# Altium footprint library 5.30-BW16.PcbLib: 1 footprints
Each footprint in its own frame and in the unit in brackets; x right, y up, seen from the top. Pads: shape width x height; smd on the part's side, far side on the other; paste and mask are expansions set on the pad; w line width, h text height; cw(c..) or ccw(c..) is an arc to the next point about the centre after c.
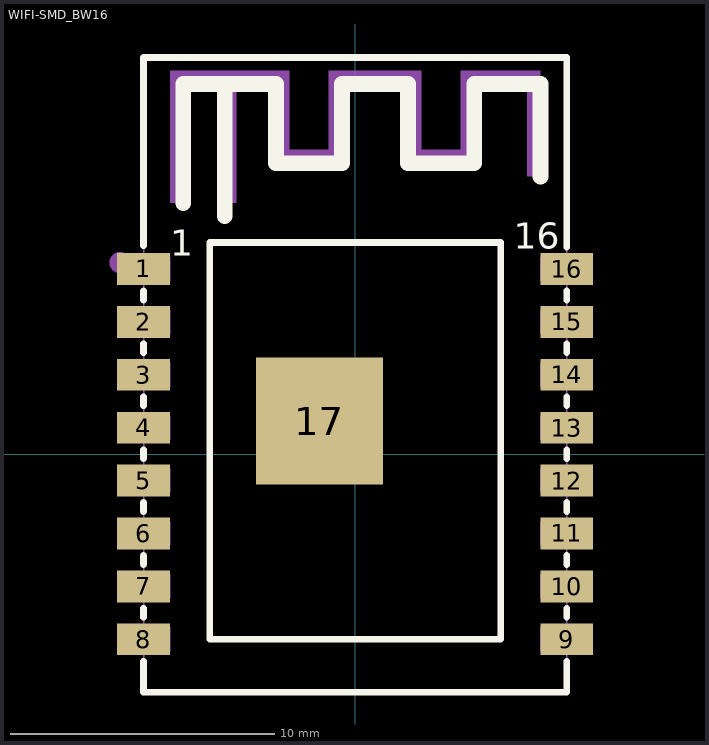
[diagram p0: the footprint, top view; thin cyan lines are the x and y axes]

## WIFI-SMD_BW16 [mm]
pads (17):
  rect 2x1.2 smd paste+0 mask+0.05: 1(-8,7) 2(-8,5) 3(-8,3) 4(-8,1) 5(-8,-1) 6(-8,-3) 7(-8,-5) 8(-8,-7) 9(8,-7) 10(8,-5) 11(8,-3) 12(8,-1) 13(8,1) 14(8,3) 15(8,5) 16(8,7)
  rect 4.8x4.8 smd paste+0 mask+0.05: 17(-1.35,1.25)
Top Overlay:
  lines w0.254: -8.001,7.874 -8,14.923 ; -8,-7.831 -8,-8.5 -8,-9 8,-9 8,-8.5 8,-7.831 ; -8,-6.169 -8,-5.831 ; -8,-4.169 -8,-3.831 ; -8,-2.169 -8,-1.831 ; -8,-0.169 -8,0.169 ; -8,1.831 -8,2.169 ; -8,3.831 -8,4.169 ; -8,5.831 -8,6.169 ; -8,15 8,15 ; 8,-6.169 8,-5.831 ; 8,-4.169 8,-3.831 ; 8,-2.169 8,-1.831 ; 8,-0.169 8,0.169 ; 8,1.831 8,2.169 ; 8,3.831 8,4.169 ; 8,5.831 8,6.169 ; 8,7.831 8.002,15.001 ; -5.5,-7 5.5,-7 5.5,8 -5.5,8 -5.5,-7
  lines w0.6: -6.5,9.501 -6.5,13.999 -3,13.999 -3,11 -0.5,11 -0.5,13.999 1.999,13.999 1.999,11 4.501,11 4.501,13.999 ; -4.93,9 -4.93,13.999 ; 4.5,14 7,14 7,10.5
  text "1" at -7,7.5 h1
  text "16" at 6,7.766 h1
Mechanical 6:
  circle w0.4: c-8.89,7.239 r0.2
  region: -7,9.5 -7,14.5 -6.5,14.5 -6.5,9.5
  region: -6.5,14.5 -5,14.5 -5,14 -6.5,14
  region: -5,14.5 -4.5,14.5 -4.5,9.5 -5,9.5
  region: -4.5,14.5 -2.5,14.5 -2.5,14 -4.5,14
  region: -2.5,14 -2.5,11 -3,11 -3,14
  region: -0.5,11.5 -0.5,11 -2.5,11 -2.5,11.5
  region: -0.5,11.5 -0.5,14.5 -1,14.5 -1,11.5
  region: -0.5,14.5 2.5,14.5 2.5,14 -0.5,14
  region: 2.5,14 2.5,11 2,11 2,14
  region: 2.5,11 4.5,11 4.5,11.5 2.5,11.5
  region: 4.5,11.5 4.5,14.5 4,14.5 4,11.5
  region: 4.5,14.5 7,14.5 7,14 4.5,14
  region: 7,14 7,10.5 6.5,10.5 6.5,14
Mechanical 15:
  region: -7.94,15 -7.94,14.975 -7.975,14.94 -8.025,14.94 -8.06,14.975 -8.06,15 -8.06,15.025 -8.025,15.06 -7.975,15.06 -7.94,15.025 -7.94,15
  region: 7,6.55 7,7.45 8,7.45 8,6.55
  region: 7,4.55 7,5.45 8,5.45 8,4.55
  region: 7,2.55 7,3.45 8,3.45 8,2.55
  region: 7,0.55 7,1.45 8,1.45 8,0.55
  region: 7,-1.45 7,-0.55 8,-0.55 8,-1.45
  region: 7,-3.45 7,-2.55 8,-2.55 8,-3.45
  region: 7,-5.45 7,-4.55 8,-4.55 8,-5.45
  region: 7,-7.45 7,-6.55 8,-6.55 8,-7.45
  region: -7,-6.55 -7,-7.45 -8,-7.45 -8,-6.55
  region: -7,-4.55 -7,-5.45 -8,-5.45 -8,-4.55
  region: -7,-2.55 -7,-3.45 -8,-3.45 -8,-2.55
  region: -7,-0.55 -7,-1.45 -8,-1.45 -8,-0.55
  region: -7,1.45 -7,0.55 -8,0.55 -8,1.45
  region: -7,3.45 -7,2.55 -8,2.55 -8,3.45
  region: -7,5.45 -7,4.55 -8,4.55 -8,5.45
  region: -7,7.45 -7,6.55 -8,6.55 -8,7.45
  region: -3.7,-1.1 -3.7,3.6 1,3.6 1,-1.1
  lines w0.051: -8,-9 -8,15 8,15 8,-9 -8,-9
3D body "L1~WIFI-SMD_BW16~WIFI-SMD_BW16~0a8I.STEP": height 2.81, standoff 0, extent -8,-8.984 8,15.016